# Altium schematic symbol library IPS2050HTR.SchLib: 1 symbol
Pins are listed as number, name and electrical type; pins without a type are passive.

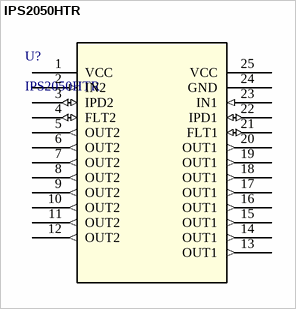
[diagram p0: symbol IPS2050HTR]

## IPS2050HTR
designator U?
High efficiency, high-side switch with extended diagnostics and smart driving for capacitive loads; Manufacturer_Name: STMicroelectronics; Copyright: Copyright (C) 2026 Ultra Librarian. All rights reserved.; Manufacturer_Part_Number: IPS2050HTR; Datasheet: https://www.st.com/resource/en/datasheet/ips2050h.pdf; RefDes: RefDes; Type: Type
footprint POWERSSO-24_STM
pins: 1 VCC (power), 2 IN2 (in), 3 IPD2 (io), 4 FLT2 (io), 5 OUT2 (out), 6 OUT2 (out), 7 OUT2 (out), 8 OUT2 (out), 9 OUT2 (out), 10 OUT2 (out), 11 OUT2 (out), 12 OUT2 (out), 13 OUT1 (out), 14 OUT1 (out), 15 OUT1 (out), 16 OUT1 (out), 17 OUT1 (out), 18 OUT1 (out), 19 OUT1 (out), 20 OUT1 (out), 21 FLT1 (io), 22 IPD1 (io), 23 IN1 (in), 24 GND (power), 25 VCC (power)